# Altium schematic symbol library Schlib1.SchLib: 108 symbols (part 1 of 2)
Pins are listed as number, name and electrical type; pins without a type are passive.

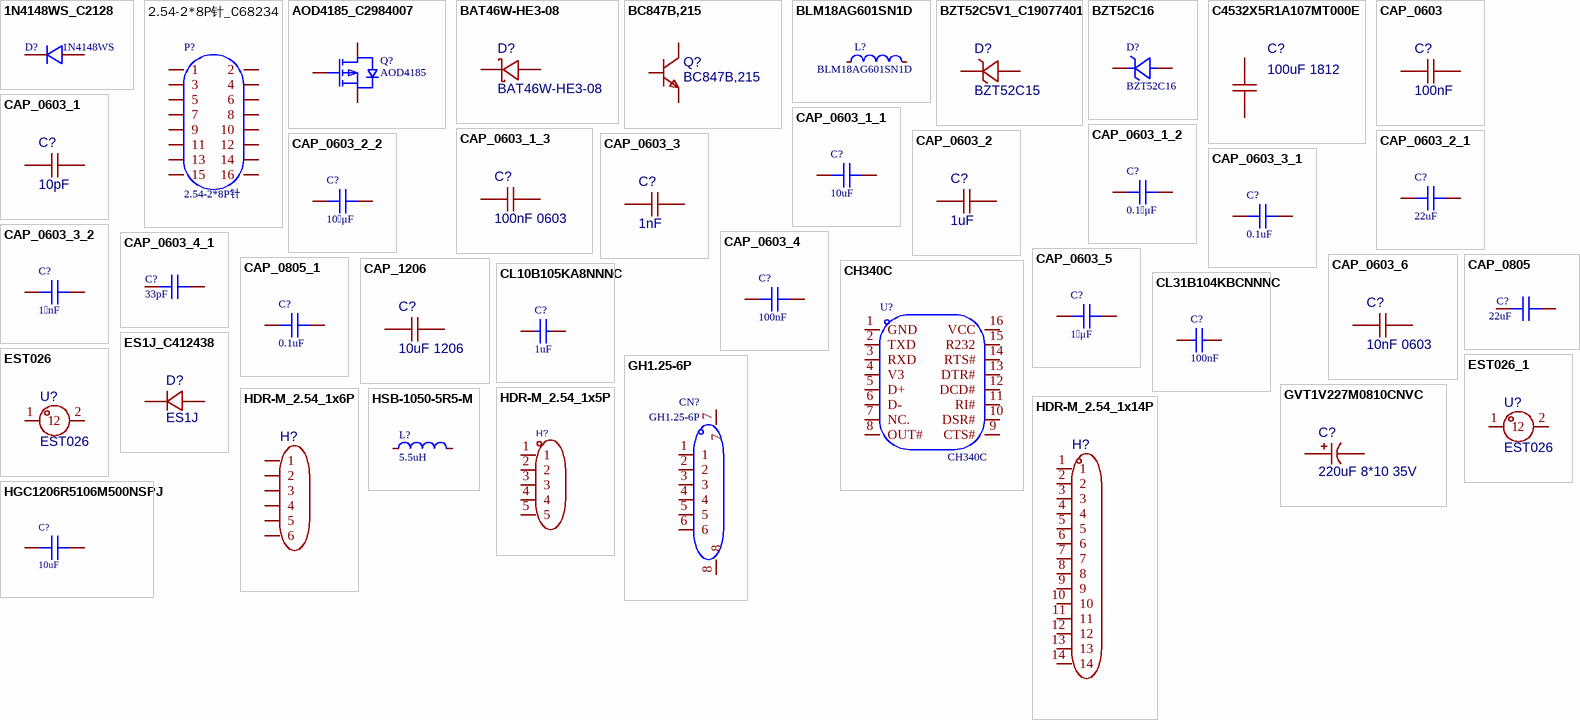
[diagram p0: symbols 1N4148WS_C2128 to HSB-1050-5R5-M]

## 1N4148WS_C2128
designator D?, comment 1N4148WS
二极管配置:独立式;整流电流:150mA;直流反向耐压(Vr):100V;正向压降(Vf):1.25V@150mA;反向恢复时间(Trr):4ns;; Manufacturer: CJ(江苏长电/长晶); Symbol: 1N4148WS T4; Device: 1N4148WS_C2128; 3D Model: db63db13d9e342eb939127d413d6200b聨0819f05c4eef4c71ace90d822a990e87; 3D Model Transform: 104.3305,51.181,0,0,0,0,0,-0.004,0; Diode Configuration: 独立式; Pd - Power Dissipation: 200mW; Current - Rectified: 150mA; Voltage - DC Reverse(Vr): 100V; Non-Repetitive Peak Forward Surge Current: 2A; Reverse Leakage Current (Ir): 1uA@75V; Reverse Recovery Time (trr): 4ns; AddInBom: yes; ModelName: SOD-323_L1.8-W1.3-LS2.5-RD; LCSC Part Name: 丝印T4 100V 150mA; Supplier Part: C2128; Manufacturer Part: 1N4148WS; Supplier Footprint: SOD-323; JLCPCB Part Class: Basic Part; Datasheet: https://item.szlcsc.com/datasheet/1N4148WS/2485.html; Supplier: LCSC; Voltage - Forward(Vf@If): 1.25V@150mA; Operating Junction Temperature Range: -; ConvertToPcb: yes; FootprintName: SOD-323_L1.8-W1.3-LS2.5-RD
footprint SOD-323_L1.8-W1.3-LS2.5-RD
3D model SOD-323_L1.8-W1.3-LS2.5-RD
pins: 1 K, 2 A

## 2.54-2*8P针_C68234
designator P?, comment 2.54-2*8P针
插针结构:2x8P;间距:2.54mm;行距:2.54mm;圆针/方针:方针;安装方式:直插;排数:双排;总PIN位数:16P;额定电流:3A;额定电压:-;配合针长度:5.9mm;塑高:2.54mm;端接针长度:3mm;触头材质:黄铜;触头镀层:金;工作温度:-55℃~+105℃;颜色:黑色;; Manufacturer: BOOMELE(博穆精密); Symbol: Header-Male-2.54_2x8; Device: 2.54-2*8P针_C68234; AddInBom: yes; ModelId: 4229ed04564d49dfa51d40f734d422b6聨0819f05c4eef4c71ace90d822a990e87; ModelName: HDR2.54-M-LI-2X8P; ModelTransform: 799.99844,200,0,0,0,0,0,0,-118.11; Pin Structure: 2x8P; Pitch: 2.54mm; Circluar Pins/Square Pins: 方针; Current Rating: 3A; LCSC Part Name: 2x8P 间距:2.54mm 方针 直插; SupplierPart: C68234; ManufacturerPart: 2.54-2*8P针; Supplier Footprint: 插件,P=2.54mm; JLCPCB Part Class: Extended Part; Datasheet: https://item.szlcsc.com/datasheet/2.54-2*8P%25E9%2592%2588/69336.html; Supplier: LCSC; ConvertToPcb: yes; FootprintName: HDR-TH_16P-P2.54-V-M-R2-C8-S2.54; Row Spacing: 2.54mm; Mounting Type: 直插; Number of Rows: 双排; Number of Pins: 16P; Voltage Rating (Max): -; Length of Mating Pin: 5.9mm; Insulation Height: 2.54mm; Length of End Connection Pin: 3mm; Contact Material: 黄铜; Contact Plating: 金; Operating Temperature: -55℃~+105℃; Color: 黑色
footprint HDR-TH_16P-P2.54-V-M-R2-C8-S2.54
pins: 1, 2, 3, 4, 5, 6, 7, 8, 9, 10, 11, 12, 13, 14, 15, 16

## AOD4185_C2984007
designator Q?, comment AOD4185
Manufacturer: ISC(无锡固电); Symbol: AOD4185_C2984007; 3D Model: ce57f84d66384067af8a68020b6de06d聨0819f05c4eef4c71ace90d822a990e87; 3D Model Transform: 259.842,390.52442,0,90,0,0,-39.39,0,0; AddInBom: yes; ModelName: TO-252-2L-3P_L6.6-W6.1-H2.3-LS10.1-P4.6; Device: AOD4185_C2984007; LCSC Part Name: AOD4185; Supplier Part: C2984007; Manufacturer Part: AOD4185; Supplier Footprint: TO-252; JLCPCB Part Class: Extended Part; Supplier: LCSC; ConvertToPcb: yes; FootprintName: TO-252-2_L6.6-W6.1-P4.57-LS9.9-BR-CW
footprint TO-252-2_L6.6-W6.1-P4.57-LS9.9-BR-CW
3D model TO-252-2L-3P_L6.6-W6.1-H2.3-LS10.1-P4.6
pins: 1 G, 2 D, 3 S

## BAT46W-HE3-08
designator D?
二极管配置:1个独立式;正向压降(Vf):1V@250mA;直流反向耐压(Vr):100V;整流电流:150mA;; Manufacturer: VISHAY(威世); AddInBom: yes; ModelId: 7884390a25fb4c08947731ebfba7e3f8; ModelName: SOD-123_L2.8-W1.8-LS3.7-RD; ModelTransform: 144.8816,62.992,0,0,0,0,0,0,0; Diode Configuration: 1个独立式; Voltage - DC Reverse(Vr): 100V; Current - Rectified: 150mA; Reverse Leakage Current (Ir): 5uA@75V; Non-Repetitive Peak Forward Surge Current: 750mA; Symbol: BAT46W-HE3-08; Device: BAT46W-HE3-08; LCSC Part Name: 停产 电压:100V 电流:150mA; SupplierPart: C145279; ManufacturerPart: BAT46W-HE3-08; Supplier Footprint: SOD-123; JLCPCB Part Class: 扩展库; Datasheet: https://item.szlcsc.com/datasheet/BAT46W-HE3-08/156611.html; Supplier: LCSC; ConvertToPcb: yes; FootprintName: SOD-123_L2.8-W1.8-LS3.7-RD; Voltage - Forward(Vf@If): 1V@250mA
footprint SOD-123_L2.8-W1.8-LS3.7-RD
pins: 1 K, 2 A

## BC847B,215
designator Q?
晶体管类型:NPN;集电极电流(Ic):100mA;集射极击穿电压(Vceo):45V;功率(Pd):250mW;直流电流增益(hFE@Ic,Vce):200@2mA,5V;; Manufacturer: Nexperia(安世); AddInBom: yes; ModelId: c62791f0466c4ae2a892c056b845b0ca; ModelName: SOT-23-3P_L2.9-W1.3-H1.0-LS2.4-P0.95; ModelTransform: 98.425,114.173,0,180,0,0,0.0005,-0.0005,0; Transistor Type: NPN; Collector Current (Ic): 100mA; Collector-Emitter Breakdown Voltage (Vceo): 45V; Power Dissipation (Pd): 250mW; Transition Frequency (fT): 100MHz; Collector Cut-Off Current (Icbo): 5uA; Collector-Emitter Saturation Voltage (VCE(sat)@Ic,Ib): 200mV@100mA,5mA; Symbol: BC847B,215; Device: BC847B,215; LCSC Part Name: NPN 电流:100mA 耐压:45V hfe=200~450; SupplierPart: C57668; ManufacturerPart: BC847B,215; Supplier Footprint: SOT-23; JLCPCB Part Class: 扩展库; Datasheet: https://atta.szlcsc.com/upload/public/pdf/source/20230809/3408F6A472B40CAE49D6B736987AA441.pdf; Supplier: LCSC; ConvertToPcb: yes; FootprintName: SOT-23-3_L2.9-W1.3-P1.90-LS2.4-BR; DC Current Gain (hFE@Ic,Vce): 200@2mA,5V; Operating Temperature: -65℃~+150℃
footprint SOT-23-3_L2.9-W1.3-P1.90-LS2.4-BR
pins: 1, 2, 3

## BLM18AG601SN1D
designator L?
阻抗@频率:600Ω@100MHz;误差:±25%;直流电阻(DCR):380mΩ;; Manufacturer: muRata(村田); 3D Model: 2bc5ec593d464d6ba9807aec0b5673c2聨0819f05c4eef4c71ace90d822a990e87; 3D Model Transform: 62.992,31.496,0,180,0,0,0.094,0.629,0; Tolerance: ±25%; DC Resistance(DCR): 380mΩ; Current Rating: 500mA; Number of Circuits: 1; AddInBom: yes; ModelName: L0603_L1.6-W0.8-H0.5_BEAD; Symbol: BLM18AG601SN1D; Device: BLM18AG601SN1D; LCSC Part Name: 单路 0603磁珠 阻抗600Ω@100MHz; Supplier Part: C19330; Manufacturer Part: BLM18AG601SN1D; Supplier Footprint: 0603; JLCPCB Part Class: Extended Part; Datasheet: https://item.szlcsc.com/datasheet/BLM18AG601SN1D/20038.html; Supplier: LCSC; Impedance @ Frequency: 600Ω@100MHz; Operating Temperature: -55℃~+125℃; ConvertToPcb: yes; FootprintName: L0603
footprint L0603
3D model L0603_L1.6-W0.8-H0.5_BEAD
pins: 1, 2

## BZT52C5V1_C19077401
designator D?, comment BZT52C15
二极管配置:独立式;稳压值(标称值):5.1V;稳压值(范围):4.85V~5.36V;耗散功率(Pd):350mW;; Manufacturer: R+O(宏嘉诚); Symbol: BZT52C5V1_C19077401; AddInBom: yes; ModelId: ad7e39f9e5534b3c96ffdc5532ebb493; ModelName: SOD-123_L2.7-W1.6-H1.4-LS3.7; ModelTransform: 146.026,62.992,0,180,0,0,0.0005,0,0; Diode Configuration: 独立式; Zener Voltage(Nom): 5.1V; Reverse Leakage Current (Ir): 2uA; Pd - Power Dissipation: 350mW; Impedance(Zzt): 60Ω; Impedance(Zzk): 480Ω; Operating Junction Temperature Range: -55℃~+150℃; Manufacturer Part: BZT52C15; Device: BZT52C5V1_C19077401; LCSC Part Name: 表面贴装齐纳二极管; SupplierPart: C19077401; Supplier Footprint: SOD-123; JLCPCB Part Class: 扩展库; Datasheet: https://item.szlcsc.com/datasheet/BZT52C5V1/20275486.html; Supplier: LCSC; ConvertToPcb: yes; FootprintName: SOD-123_L2.7-W1.6-LS3.7-RD; Zener Voltage(Range): 4.85V~5.36V
footprint SOD-123_L2.7-W1.6-LS3.7-RD
pins: 1 K, 2 A

## BZT52C16
designator D?
二极管配置:独立式;稳压值(标称值):16V;稳压值(范围):15.3V~17.1V;耗散功率(Pd):500mW;; Manufacturer: Slkor(萨科微); Symbol: BZT52C16_C707145; 3D Model: ad7e39f9e5534b3c96ffdc5532ebb493聨0819f05c4eef4c71ace90d822a990e87; 3D Model Transform: 146.026,62.992,0,180,0,0,0.0005,0,0; Diode Configuration: 独立式; Zener Voltage(Nom): 16V; Reverse Leakage Current (Ir): 100nA; Pd - Power Dissipation: 500mW; Impedance(Zzt): 40Ω; Operating Junction Temperature Range: -65℃~+150℃; AddInBom: yes; ModelName: SOD-123_L2.7-W1.6-H1.4-LS3.7; Device: BZT52C16; LCSC Part Name: 独立式 耐压:16V 电流:0.1uA; Supplier Part: C707145; Manufacturer Part: BZT52C16; Supplier Footprint: SOD-123; JLCPCB Part Class: Extended Part; Datasheet: https://item.szlcsc.com/datasheet/BZT52C16/744267.html; Supplier: LCSC; Zener Voltage(Range): 15.3V~17.1V; ConvertToPcb: yes; FootprintName: SOD-123_L2.7-W1.6-LS3.7-RD
footprint SOD-123_L2.7-W1.6-LS3.7-RD
3D model SOD-123_L2.7-W1.6-H1.4-LS3.7
pins: 1 K, 2 A

## C4532X5R1A107MT000E
designator C?, comment 100uF 1812
容值:100uF;精度:±20%;额定电压:10V;温度系数:X5R;; Manufacturer: TDK; Symbol: C4532X5R1A107MT000E; AddInBom: yes; ModelId: 654205cbd64044c4b833fe7af5979bc9; ModelName: C1812_L4.5-W3.2-H2.6; ModelTransform: 177.165,125.984,0,0,0,0,0.0005,0,0; Tolerance: ±20%; Voltage Rating: 10V; Temperature Coefficient: X5R; Value: 100uF 1812; Device: C4532X5R1A107MT000E; LCSC Part Name: 100uF ±20% 10V; ManufacturerPart: C4532X5R1A107MT000E; Supplier Footprint: 1812; JLCPCB Part Class: 扩展库; Datasheet: https://item.szlcsc.com/datasheet/C4532X5R1A107MT000E/319453.html; Supplier: LCSC; ConvertToPcb: yes; FootprintName: C1812
footprint C1812
pins: 1, 2

## CAP_0603
designator C?, comment 100nF
Device: CAP_0603; ConvertToPcb: yes; SymbolName: CapAcitance; ModelId: ac125912035d415993ca9572d50418b1; ModelName: C0603_L1.6-W0.8-H0.8; ModelTransform: 62.992,31.496,0,0,0,0,0,0,0; AddInBom: yes; Supplier Footprint: 0603; FootprintName: C0603; Value: 100nF
footprint C0603
pins: 1, 2

## CAP_0603_1
designator C?, comment 10pF
Device: CAP_0603; ConvertToPcb: yes; SymbolName: CapAcitance; ModelId: ac125912035d415993ca9572d50418b1; ModelName: C0603_L1.6-W0.8-H0.8; ModelTransform: 62.992,31.496,0,0,0,0,0,0,0; Value: 10pF; AddInBom: yes; Supplier Footprint: 0603; FootprintName: C0603
footprint C0603
pins: 1, 2

## CAP_0603_1_1
designator C?, comment 10uF
Symbol: Capacitance; Device: CAP_0603; 3D Model: ac125912035d415993ca9572d50418b1聨0819f05c4eef4c71ace90d822a990e87; 3D Model Transform: 62.992,31.496,0,0,0,0,0,0,0; ConvertToPcb: yes; ModelName: C0603_L1.6-W0.8-H0.8; Supplier Footprint: 0603; Value: 10uF; AddInBom: yes; FootprintName: C0402
footprint C0402
3D model C0603_L1.6-W0.8-H0.8
pins: 1, 2

## CAP_0603_1_2
designator C?, comment 0.1 μF
Symbol: Capacitance; Device: CAP_0603; 3D Model: ac125912035d415993ca9572d50418b1聨0819f05c4eef4c71ace90d822a990e87; 3D Model Transform: 62.992,31.496,0,0,0,0,0,0,0; ConvertToPcb: yes; ModelName: C0603_L1.6-W0.8-H0.8; Value: 0.1 μF; Supplier Footprint: 0603; AddInBom: yes; FootprintName: C0603
footprint C0603
3D model C0603_L1.6-W0.8-H0.8
pins: 1, 2

## CAP_0603_1_3
designator C?, comment 100nF 0603
Device: CAP_0603; ConvertToPcb: yes; SymbolName: CapAcitance; ModelId: ac125912035d415993ca9572d50418b1; ModelName: C0603_L1.6-W0.8-H0.8; ModelTransform: 62.992,31.496,0,0,0,0,0,0,0; Value: 100nF 0603; AddInBom: yes; Supplier Footprint: 0603; FootprintName: C0603
footprint C0603
pins: 1, 2

## CAP_0603_2
designator C?, comment 1uF
Device: CAP_0603; ConvertToPcb: yes; SymbolName: CapAcitance; ModelId: ac125912035d415993ca9572d50418b1; ModelName: C0603_L1.6-W0.8-H0.8; ModelTransform: 62.992,31.496,0,0,0,0,0,0,0; Value: 1uF; AddInBom: yes; Supplier Footprint: 0603; FootprintName: C0603
footprint C0603
pins: 1, 2

## CAP_0603_2_1
designator C?, comment 22uF
Symbol: Capacitance; Device: CAP_0603; 3D Model: ac125912035d415993ca9572d50418b1聨0819f05c4eef4c71ace90d822a990e87; 3D Model Transform: 62.992,31.496,0,0,0,0,0,0,0; ConvertToPcb: yes; ModelName: C0603_L1.6-W0.8-H0.8; Supplier Footprint: 0603; Value: 22uF; AddInBom: yes; FootprintName: C0603
footprint C0603
3D model C0603_L1.6-W0.8-H0.8
pins: 1, 2

## CAP_0603_2_2
designator C?, comment 10 μF
Symbol: Capacitance; Device: CAP_0603; 3D Model: ac125912035d415993ca9572d50418b1聨0819f05c4eef4c71ace90d822a990e87; 3D Model Transform: 62.992,31.496,0,0,0,0,0,0,0; ConvertToPcb: yes; ModelName: C0603_L1.6-W0.8-H0.8; Value: 10 μF; Supplier Footprint: 0603; AddInBom: yes; FootprintName: C0603
footprint C0603
3D model C0603_L1.6-W0.8-H0.8
pins: 1, 2

## CAP_0603_3
designator C?, comment 1nF
Device: CAP_0603; ConvertToPcb: yes; SymbolName: CapAcitance; ModelId: ac125912035d415993ca9572d50418b1; ModelName: C0603_L1.6-W0.8-H0.8; ModelTransform: 62.992,31.496,0,0,0,0,0,0,0; Value: 1nF; AddInBom: yes; Supplier Footprint: 0603; FootprintName: C0603
footprint C0603
pins: 1, 2

## CAP_0603_3_1
designator C?, comment 0.1uF
Symbol: Capacitance; Device: CAP_0603; 3D Model: ac125912035d415993ca9572d50418b1聨0819f05c4eef4c71ace90d822a990e87; 3D Model Transform: 62.992,31.496,0,0,0,0,0,0,0; ConvertToPcb: yes; ModelName: C0603_L1.6-W0.8-H0.8; Supplier Footprint: 0603; Value: 0.1uF; AddInBom: yes; FootprintName: C0603
footprint C0603
3D model C0603_L1.6-W0.8-H0.8
pins: 1, 2

## CAP_0603_3_2
designator C?, comment 1 nF
Symbol: Capacitance; Device: CAP_0603; 3D Model: ac125912035d415993ca9572d50418b1聨0819f05c4eef4c71ace90d822a990e87; 3D Model Transform: 62.992,31.496,0,0,0,0,0,0,0; ConvertToPcb: yes; ModelName: C0603_L1.6-W0.8-H0.8; Value: 1 nF; Supplier Footprint: 0603; AddInBom: yes; FootprintName: C0603
footprint C0603
3D model C0603_L1.6-W0.8-H0.8
pins: 1, 2

## CAP_0603_4
designator C?, comment 100nF
Symbol: Capacitance; Device: CAP_0603; 3D Model: ac125912035d415993ca9572d50418b1聨0819f05c4eef4c71ace90d822a990e87; 3D Model Transform: 62.992,31.496,0,0,0,0,0,0,0; ConvertToPcb: yes; ModelName: C0603_L1.6-W0.8-H0.8; Supplier Footprint: 0603; Value: 100nF; AddInBom: yes; FootprintName: C0402
footprint C0402
3D model C0603_L1.6-W0.8-H0.8
pins: 1, 2

## CAP_0603_4_1
designator C?, comment 33pF
Symbol: Capacitance; Device: CAP_0603; 3D Model: ac125912035d415993ca9572d50418b1聨0819f05c4eef4c71ace90d822a990e87; 3D Model Transform: 62.992,31.496,0,0,0,0,0,0,0; ConvertToPcb: yes; ModelName: C0603_L1.6-W0.8-H0.8; Supplier Footprint: 0603; Value: 33pF; AddInBom: yes; FootprintName: C0603
footprint C0603
3D model C0603_L1.6-W0.8-H0.8
pins: 1, 2

## CAP_0603_5
designator C?, comment 1 μF
Symbol: Capacitance; Device: CAP_0603; 3D Model: ac125912035d415993ca9572d50418b1聨0819f05c4eef4c71ace90d822a990e87; 3D Model Transform: 62.992,31.496,0,0,0,0,0,0,0; ConvertToPcb: yes; ModelName: C0603_L1.6-W0.8-H0.8; Value: 1 μF; Supplier Footprint: 0603; AddInBom: yes; FootprintName: C0603
footprint C0603
3D model C0603_L1.6-W0.8-H0.8
pins: 1, 2

## CAP_0603_6
designator C?, comment 10nF 0603
Device: CAP_0603; ConvertToPcb: yes; SymbolName: CapAcitance; ModelId: ac125912035d415993ca9572d50418b1; ModelName: C0603_L1.6-W0.8-H0.8; ModelTransform: 62.992,31.496,0,0,0,0,0,0,0; Value: 10nF 0603; AddInBom: yes; Supplier Footprint: 0603; FootprintName: C0603
footprint C0603
pins: 1, 2

## CAP_0805
designator C?, comment 22uF
Symbol: Capacitance; Device: CAP_0805; 3D Model: 1ba041120af144c991958decab20d241聨0819f05c4eef4c71ace90d822a990e87; 3D Model Transform: 78.74,51.181,0,0,0,0,0,0.0005,0; ConvertToPcb: yes; ModelName: C0805_L2.0-W1.3-H1.3; Supplier Footprint: 0805; Value: 22uF; AddInBom: yes; FootprintName: C0805
footprint C0805
3D model C0805_L2.0-W1.3-H1.3
pins: 1, 2

## CAP_0805_1
designator C?, comment 0.1uF
Symbol: Capacitance; Device: CAP_0805; 3D Model: 1ba041120af144c991958decab20d241聨0819f05c4eef4c71ace90d822a990e87; 3D Model Transform: 78.74,51.181,0,0,0,0,0,0.0005,0; ConvertToPcb: yes; ModelName: C0805_L2.0-W1.3-H1.3; Supplier Footprint: 0805; Value: 0.1uF; AddInBom: yes; FootprintName: C0603
footprint C0603
3D model C0805_L2.0-W1.3-H1.3
pins: 1, 2

## CAP_1206
designator C?, comment 10uF 1206
Device: CAP_1206; ConvertToPcb: yes; SymbolName: CapAcitance; ModelId: e4be705b945545a48e666415e3682bd8; ModelName: C1206_L3.2-W1.6-H1.3; ModelTransform: 125.984,62.992,0,0,0,0,0,0,0; Value: 10uF 1206; AddInBom: yes; Supplier Footprint: 1206; FootprintName: C1206
footprint C1206
pins: 1, 2

## CH340C
designator U?
应用功能:收发器;USB协议版本:USB 2.0;通道数:-;数据速率:2Mbps;; Manufacturer: WCH(南京沁恒); 3D Model: 3361a6792abf4a8f8fbca4f1924a67ee聨0819f05c4eef4c71ace90d822a990e87; 3D Model Transform: 240.39054,393.7,0,90,0,0,0,0,0; Applications Function: 收发器; USB Protocol: USB 2.0; Voltage - Supply: 3.3V；5V; Data Rate: 2Mbps; Current - Supply: 7mA; Quiescent Supply Current: 50uA; AddInBom: yes; ModelName: SOP-16_L9.9-W3.9-H1.5-LS6.0-P1.27; Symbol: CH340C; Device: CH340C; LCSC Part Name: USB转串口芯片; Supplier Part: C84681; Manufacturer Part: CH340C; Supplier Footprint: SOP-16; JLCPCB Part Class: Extended Part; Datasheet: https://item.szlcsc.com/datasheet/CH340C/85852.html; Supplier: LCSC; Number of Channels: -; Operating Temperature: -20℃~+70℃; Features: 可编程波特率；内置时钟发生器；上电复位; ConvertToPcb: yes; FootprintName: SOP-16_L10.0-W3.9-P1.27-LS6.0-BL
footprint SOP-16_L10.0-W3.9-P1.27-LS6.0-BL
3D model SOP-16_L9.9-W3.9-H1.5-LS6.0-P1.27
pins: 1 GND, 2 TXD, 3 RXD, 4 V3, 5 D+, 6 D-, 7 NC., 8 OUT#, 9 CTS#, 10 DSR#, 11 RI#, 12 DCD#, 13 DTR#, 14 RTS#, 15 R232, 16 VCC

## CL10B105KA8NNNC
designator C?, comment 1uF
容值:1uF;精度:±10%;额定电压:25V;温度系数:X7R;; Manufacturer: SAMSUNG(三星); Symbol: CL10B105KA8NNNC; 3D Model: ac125912035d415993ca9572d50418b1聨0819f05c4eef4c71ace90d822a990e87; 3D Model Transform: 62.992,31.496,0,0,0,0,0,0,0; Tolerance: ±10%; Voltage Rating: 25V; Temperature Coefficient: X7R; AddInBom: yes; ModelName: C0603_L1.6-W0.8-H0.8; Device: CL10B105KA8NNNC; LCSC Part Name: 1uF ±10% 25V; Supplier Part: C29936; Manufacturer Part: CL10B105KA8NNNC; Supplier Footprint: 0603; JLCPCB Part Class: Extended Part; Datasheet: https://item.szlcsc.com/datasheet/CL10B105KA8NNNC/30690.html; Supplier: LCSC; Value: 1uF; ConvertToPcb: yes; FootprintName: C0603
footprint C0603
3D model C0603_L1.6-W0.8-H0.8
pins: 1, 2

## CL31B104KBCNNNC
designator C?, comment 100nF
容值:100nF;精度:±10%;额定电压:50V;温度系数:X7R;; Manufacturer: SAMSUNG(三星); Symbol: CL31B104KBCNNNC; AddInBom: yes; ModelId: e4be705b945545a48e666415e3682bd8聨0819f05c4eef4c71ace90d822a990e87; ModelName: C1206_L3.2-W1.6-H1.3; ModelTransform: 125.984,62.992,0,0,0,0,0,0,0; Tolerance: ±10%; Voltage Rating: 50V; Temperature Coefficient: X7R; Device: CL31B104KBCNNNC; LCSC Part Name: 100nF ±10% 50V; SupplierPart: C24497; ManufacturerPart: CL31B104KBCNNNC; Supplier Footprint: 1206; JLCPCB Part Class: Basic Part; Datasheet: https://item.szlcsc.com/datasheet/CL31B104KBCNNNC/25237.html; Supplier: LCSC; ConvertToPcb: yes; FootprintName: C1206; Value: 100nF
footprint C1206
pins: 1, 2

## ES1J_C412438
designator D?, comment ES1J
二极管配置:独立式;正向压降(Vf):1.7V@1A;直流反向耐压(Vr):600V;整流电流:1A;反向恢复时间(Trr):35ns;; Manufacturer: MDD(辰达半导体); Symbol: ES1JG_C412438; Device: ES1J_C412438; AddInBom: yes; ModelId: 4f1e9ef2303f48b48aa8ce0cacf8d7b1; ModelName: SMA_L4.4-W2.8-LS5.4-RD; ModelTransform: 204.724,102.362,0,0,0,0,0,0,0; Diode Configuration: 独立式; Voltage - DC Reverse(Vr): 600V; Current - Rectified: 1A; Reverse Leakage Current (Ir): 5uA@600V; Reverse Recovery Time (trr): 35ns; Operating Junction Temperature Range: -55℃~+150℃@(Tj); LCSC Part Name: 耐压:600V 电流:1A 反向恢复时间：35ns; SupplierPart: C412438; ManufacturerPart: ES1J; Supplier Footprint: SMA; JLCPCB Part Class: 扩展库; Datasheet: https://item.szlcsc.com/datasheet/ES1J/404261.html; Supplier: LCSC; ConvertToPcb: yes; FootprintName: SMA_L4.4-W2.8-LS5.4-RD; Voltage - Forward(Vf@If): 1.7V@1A
footprint SMA_L4.4-W2.8-LS5.4-RD
pins: 1 C, 2 A

## EST026
designator U?
环保; Manufacturer: xcfuse(旭程); AddInBom: yes; ModelId: caeb915258b34f389ee2048176497ca2; ModelName: CONN-TH_L6.3-W0.8-EST026; ModelTransform: 328.7395,78.74,0,0,0,0,0,0,-137.795; Symbol: EST026; Device: EST026; LCSC Part Name: EST026; SupplierPart: C52878; ManufacturerPart: EST026; Supplier Footprint: 插件; JLCPCB Part Class: 扩展库; Datasheet: https://item.szlcsc.com/datasheet/EST026/53893.html; Supplier: LCSC; ConvertToPcb: yes; FootprintName: CONN-TH_L6.3-W0.8-EST026
footprint CONN-TH_L6.3-W0.8-EST026
pins: 1, 2

## EST026_1
designator U?, comment EST026
环保; Manufacturer: xcfuse(旭程); AddInBom: yes; ModelId: caeb915258b34f389ee2048176497ca2; ModelName: CONN-TH_L6.3-W0.8-EST026; ModelTransform: 328.7395,78.74,0,0,0,0,0,0,-137.795; Symbol: EST026; Device: EST026; LCSC Part Name: EST026; SupplierPart: C52878; ManufacturerPart: EST026; Supplier Footprint: 插件; JLCPCB Part Class: 扩展库; Datasheet: https://item.szlcsc.com/datasheet/EST026/53893.html; Supplier: LCSC; ConvertToPcb: yes; FootprintName: CONN-TH_L6.3-W0.8-EST026
footprint CONN-TH_L6.3-W0.8-EST026
pins: 1, 2

## GH1.25-6P
designator CN?
AddInBom: yes; ModelId: 9359f40e5f53415caaa6244a3307f3f9聨0819f05c4eef4c71ace90d822a990e87; ModelName: CONN-SMD_GH1.25-6P; ModelTransform: 425.196,194.8815,0,0,0,0,0,-9.646,0; Symbol: GH1.25-6P; Device: GH1.25-6P; LCSC Part Name: GH1.25-6P; SupplierPart: C9900018610; ManufacturerPart: GH1.25-6P; Supplier Footprint: GH1.25-6P; JLCPCB Part Class: Extended Part; Supplier: LCSC; ConvertToPcb: yes; FootprintName: CONN-SMD_GH1.25-6P
footprint CONN-SMD_GH1.25-6P
pins: 1, 2, 3, 4, 5, 6, 7, 8

## GVT1V227M0810CNVC
designator C?, comment 220uF 8*10 35V
容值:220uF;精度:±20%;额定电压:35V;纹波电流:175mA@120Hz;; Manufacturer: HRK(鸿瑞凯电子); Symbol: GVT1V227M0810CNVC; AddInBom: yes; ModelId: 5c9301d64f8b45ea89e061ac72e6cbf7; ModelName: CAP-SMD_BD8.0-L8.3-W8.3-FD; ModelTransform: 393.7,326.771,0,180,0,0,0,0,0; Tolerance: ±20%; φD: 8mm; L: 10.5mm; Lifetime @ Temp: 2000hrs@105℃; Value: 220uF 8*10 35V; Device: GVT1V227M0810CNVC; LCSC Part Name: 220uF ±20% 35V; ManufacturerPart: GVT1V227M0810CNVC; Supplier Footprint: SMD,D8xL10.5mm; JLCPCB Part Class: 扩展库; Datasheet: https://atta.szlcsc.com/upload/public/pdf/source/20220321/BA17E910A44EA2B508CDD6AB8BA576BA.pdf; Supplier: LCSC; ConvertToPcb: yes; FootprintName: CAP-SMD_BD8.0-L8.3-W8.3-FD; Rated Voltage: 35V; Ripple Current: 175mA@120Hz; Operating Temperature: -55℃~+105℃
footprint CAP-SMD_BD8.0-L8.3-W8.3-FD
pins: 1, 2

## HDR-M_2.54_1x5P
designator H?
Manufacturer: MINTRON(明硕); Symbol: MTP125-1105S1; Device: HDR-M_2.54_1x5P; ConvertToPcb: yes; ModelId: 47d466e4a34f4fc5bc626cf773a24dd5; ModelName: HDR-TH_5P-P2.54-M-LI-1X5P; ModelTransform: 499.999,100,0,0,0,0,0,0,-118.11; Supplier: LCSC; Supplier Part: C358687; Manufacturer Part: MTP125-1105S1; JLCPCB Part Class: Extended Part; AddInBom: yes; Supplier Footprint: 插件; FootprintName: HDR-TH_5P-P2.54-V-M
footprint HDR-TH_5P-P2.54-V-M
pins: 1, 2, 3, 4, 5

## HDR-M_2.54_1x6P
designator H?
Symbol: Header-Male-2.54_1x6; Device: HDR-M_2.54_1x6P; ConvertToPcb: yes; ModelId: 60739dffc9b04830a286435b0fefbd4a; ModelName: HDR2.54-M-LI-1X6P; ModelTransform: 599.999,100,0,0,0,0,0,0,-118.11; AddInBom: yes; SupplierPart: C37208; Supplier Footprint: 插件; FootprintName: HDR-TH_6P-P2.54-V-M-1
footprint HDR-TH_6P-P2.54-V-M-1
pins: 1, 2, 3, 4, 5, 6

## HDR-M_2.54_1x14P
designator H?
间距:2.54mm;总PIN位数:14;排数:1;插针结构:1x14P;行距:-;安装类型:直插;圆针/方针:方针;额定电流:3A;额定电压:-;配合针长度:6mm;塑高:2.5mm;端接针长度:3mm;触头材质:-;工作温度范围:-40℃~+105℃;颜色:黑色;; Symbol: HDR_2.54-1x14P; Device: HDR-M_2.54_1x14P; ConvertToPcb: yes; ModelId: d38966ad4fa34699b6d9af72e76b3bd5; ModelName: HDR-TH_14P-P2.54-M-LI-1X14P; ModelTransform: 1390.155,92.913,0,0,0,0,0,0,-137.795; AddInBom: yes; SupplierPart: C2894937; Supplier Footprint: 插件; FootprintName: HDR-TH_14P-P2.54-V-M
footprint HDR-TH_14P-P2.54-V-M
pins: 1, 2, 3, 4, 5, 6, 7, 8, 9, 10, 11, 12, 13, 14

## HGC1206R5106M500NSPJ
designator C?, comment 10uF
容值:10uF;精度:±20%;额定电压:50V;温度系数:X5R;; Manufacturer: Chinocera(华瓷); Symbol: HGC1206R5106M500NSPJ; AddInBom: yes; ModelId: e4be705b945545a48e666415e3682bd8聨0819f05c4eef4c71ace90d822a990e87; ModelName: C1206_L3.2-W1.6-H1.3; ModelTransform: 125.984,62.992,0,0,0,0,0,0,0; Tolerance: ±20%; Voltage Rating: 50V; Temperature Coefficient: X5R; Device: HGC1206R5106M500NSPJ; LCSC Part Name: 10uF ±20% 50V; SupplierPart: C7432782; ManufacturerPart: HGC1206R5106M500NSPJ; Supplier Footprint: 1206; JLCPCB Part Class: Extended Part; Datasheet: https://item.szlcsc.com/datasheet/HGC1206R5106M500NSPJ/8438264.html; Supplier: LCSC; ConvertToPcb: yes; FootprintName: C1206; Value: 10uF
footprint C1206
pins: 1, 2

## HSB-1050-5R5-M
designator L?, comment 5.5uH
电感值:5.5uH;精度:±20%;额定电流:10A;饱和电流(Isat):12A;; Manufacturer: YOUCHI(佑驰); Symbol: HSB-1050-5R5-M; Tolerance: ±20%; Current Rating: 10A; Current - Saturation(Isat): 12A; DC Resistance(DCR): 10.3mΩ; AddInBom: yes; Device: HSB-1050-5R5-M; LCSC Part Name: 5.5uH  ±20%  12.0A; Supplier Part: C53373579; Manufacturer Part: HSB-1050-5R5-M; Supplier Footprint: SMD,10.5x10.2mm; JLCPCB Part Class: Extended Part; Datasheet: https://item.szlcsc.com/datasheet/HSB-1050-5R5-M/56489689.html; Supplier: LCSC; Value: 5.5uH; ConvertToPcb: yes; FootprintName: IND-SMD_L10.5-W10.2-HSB-1050
footprint IND-SMD_L10.5-W10.2-HSB-1050
pins: 1, 2

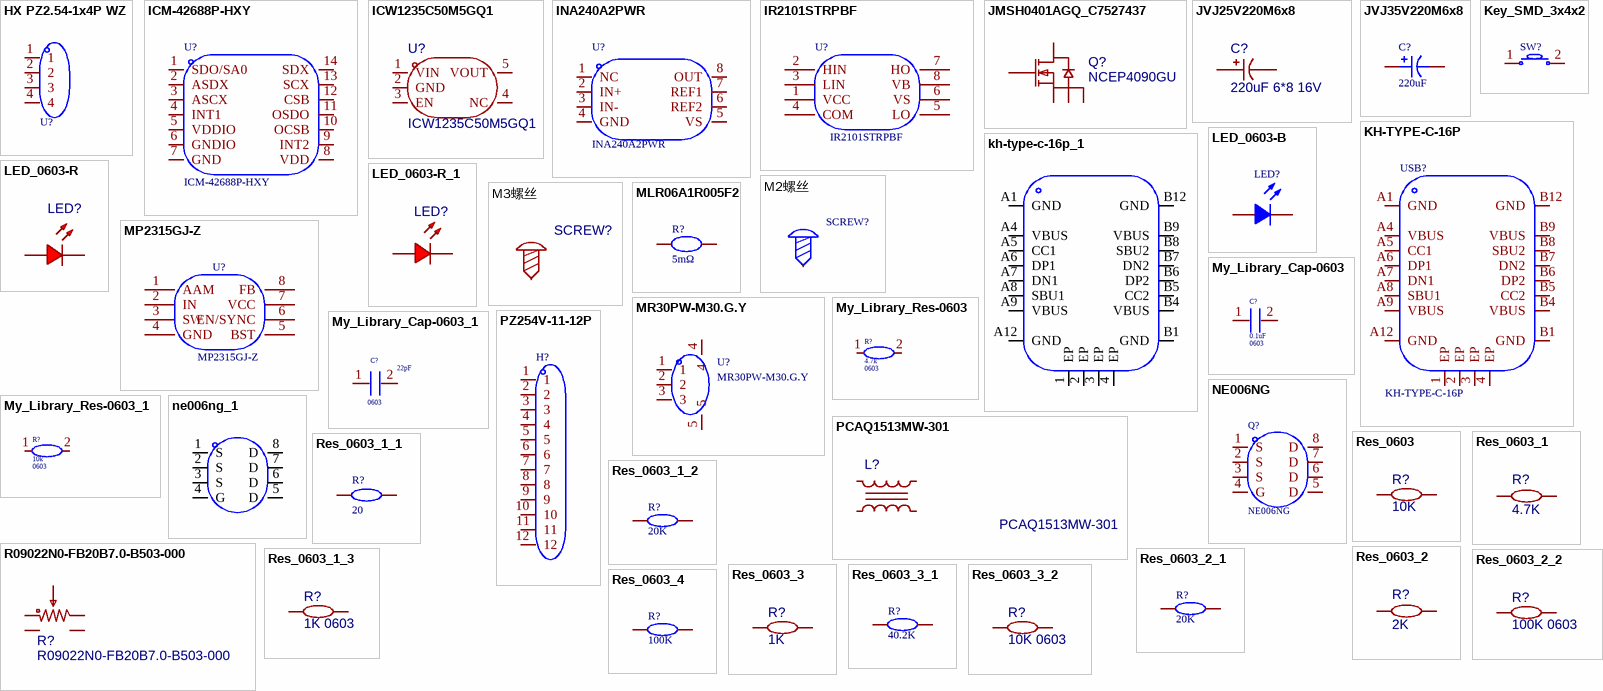
[diagram p1: symbols HX PZ2.54-1x4P WZ to Res_0603_4]

## HX PZ2.54-1x4P WZ
designator U?  (value not drawn)
插针结构:1x4P;间距:2.54mm;行距:-;圆针/方针:方针;安装方式:弯插;排数:单排;总PIN位数:4P;额定电流:3A;额定电压:1kV;配合针长度:6mm;塑高:2.5mm;端接针长度:3mm;触头材质:黄铜;触头镀层:金;工作温度:-40℃~+105℃;颜色:黑色;; Manufacturer: hanxia(韩下); AddInBom: yes; ModelId: 380738e2c3344fc1a10fb2457d15d466聨0819f05c4eef4c71ace90d822a990e87; ModelName: HDR-TH_4P-P2.54-H-M-W10.3; ModelTransform: 400.003,407.873,0,180,0,0,0,191.299,-118.11; Pin Structure: 1x4P; Pitch: 2.54mm; Circluar Pins/Square Pins: 方针; Current Rating: 3A; Voltage Rating (Max): 1kV; Symbol: HX PZ2.54-1X4P WZ; Device: HX PZ2.54-1x4P WZ; LCSC Part Name: 1x4P 间距:2.54mm 方针 弯插; SupplierPart: C32713263; ManufacturerPart: HX PZ2.54-1x4P WZ; Supplier Footprint: 弯插,P=2.54mm; JLCPCB Part Class: Extended Part; Datasheet: https://item.szlcsc.com/datasheet/HX%2520PZ2.54-1x4P%2520WZ/34444543.html; Supplier: LCSC; ConvertToPcb: yes; FootprintName: HDR-TH_4P-P2.54-H-M-W10.3; Row Spacing: -; Mounting Type: 弯插; Number of Rows: 单排; Number of Pins: 4P; Length of Mating Pin: 6mm; Insulation Height: 2.5mm; Length of End Connection Pin: 3mm; Contact Material: 黄铜; Contact Plating: 金; Operating Temperature: -40℃~+105℃; Color: 黑色; Supplementary Features: -
footprint HDR-TH_4P-P2.54-H-M-W10.3
pins: 1, 2, 3, 4

## ICM-42688P-HXY
designator U?
传感器类型:IMU;接口类型:I2C；SPI;; Manufacturer: HXY MOSFET(华轩阳电子); 3D Model: 776ff2ca16fe4df1a7cc54b42a3d63a3聨0819f05c4eef4c71ace90d822a990e87; 3D Model Transform: 118.11,98.425,0,0,0,0,-0.005,0.0005,0; Accelerometer Sensing Axis: X,Y,Z; Acceleration Measurement Range (MAX): ±16g; Gyroscope Measurement Range (MAX): ±2000dps; Sensor Type: IMU; Output Bits: 16bit; Voltage - Supply: 1.71V~3.6V; Standby Current: 4uA; AddInBom: yes; ModelName: LGA-14_L2.5-W3.0-H0.9-P0.50; Symbol: ICM-42688P-HXY; Device: ICM-42688P-HXY; LCSC Part Name: 六轴惯性传感器模块; Supplier Part: C46550687; Manufacturer Part: ICM-42688P-HXY; Supplier Footprint: LGA-14(2.5x3); JLCPCB Part Class: Extended Part; Datasheet: https://item.szlcsc.com/datasheet/ICM-42688P-HXY/48681527.html; Supplier: LCSC; Gyroscope Sensing Axis: X,Y,Z; Interface: I2C；SPI; Cache Size: -; Operating Temperature: -40℃~+85℃; ConvertToPcb: yes; FootprintName: LGA-14_L3.0-W2.5-P0.50-TL
footprint LGA-14_L3.0-W2.5-P0.50-TL
3D model LGA-14_L2.5-W3.0-H0.9-P0.50
pins: 1 SDO/SA0, 2 ASDX, 3 ASCX, 4 INT1, 5 VDDIO, 6 GNDIO, 7 GND, 8 VDD, 9 INT2, 10 OCSB, 11 OSDO, 12 CSB, 13 SCX, 14 SDX

## ICW1235C50M5GQ1
designator U?
输出类型:固定;工作电压:40V;输出电压:5V;输出电流:200mA;电源纹波抑制比(PSRR):-;输出极性:正极;; Manufacturer: ICW(艾创微); AddInBom: yes; ModelId: 7ba65df16e7b4570af156e925f9c37fe; ModelName: SOT-23-5_L2.9-W1.6-P0.95-LS2.8-BR; ModelTransform: 114.173,114.173,0,90,0,0,0,0,0; Output Type: 固定; Voltage - Supply: 40V; Output Voltage: 5V; Output Current: 200mA; standby current: 1.5uA; Output Configuration: 正极; Number of Outputs: 1; Symbol: ICW1235C50M5GQ1; Device: ICW1235C50M5GQ1; LCSC Part Name: 车规级40V耐压、低功耗、高精度LDO转换器; SupplierPart: C5448737; ManufacturerPart: ICW1235C50M5GQ1; Supplier Footprint: SOT23-5; JLCPCB Part Class: 扩展库; Datasheet: https://item.szlcsc.com/datasheet/ICW1235C50M5GQ1/6350612.html; Supplier: LCSC; ConvertToPcb: yes; FootprintName: SOT-23-5_L2.9-W1.6-P0.95-LS2.8-BR; Power Supply Rejection Ratio (PSRR): -; Features: 过热保护；过流保护; Operating Temperature: -40℃~+125℃@(Ta)
footprint SOT-23-5_L2.9-W1.6-P0.95-LS2.8-BR
pins: 1 VIN, 2 GND, 3 EN, 4 NC, 5 VOUT

## INA240A2PWR
designator U?
放大器数:单路;共模电压:-4V~80V;增益:50V/V;带宽:400kHz;; Manufacturer: TI(德州仪器); 3D Model: 85577802f9634e7e85ffa2fd25a37b6f聨0819f05c4eef4c71ace90d822a990e87; 3D Model Transform: 118.11,251.968,0,0,0,0,0,0,0; Number of Channels: 单路; Gain: 50V/V; Bandwidth: 400kHz; Ib - Input Bias Current: 90uA; Vos - Input Offset Voltage: 5uV; Differential Voltage: -80V~+80V; Single Supply: 2.7V~5.5V; Quiescent Current: 1.8mA; Input Offset Voltage Drift(Vos TC): 250nV/℃; Slew Rate: 2V/us; Common Mode Rejection Ratio (CMRR): 132dB; Noise density(eN): 40nV/√Hz@1kHz; AddInBom: yes; ModelName: TSSOP-8_L4.4-W3.0-P0.65-LS6.4-BL-2; Symbol: INA240A2PWR; Device: INA240A2PWR; LCSC Part Name: 具有增强型PWM抑制功能的高侧和低侧双向零漂移电流感测放大器; Supplier Part: C129949; Manufacturer Part: INA240A2PWR; Supplier Footprint: TSSOP-8; JLCPCB Part Class: Extended Part; Datasheet: https://www.ti.com/cn/lit/gpn/ina240; Supplier: LCSC; Vcm - Common Mode Voltage: -4V~80V; Operating Temperature: -40℃~+125℃; Maximum Power Supply Range (Vdd-Vss): -; Dual Supply: -; Output Current: -; Input Offset Current(Ios): -; Input Offset Current Drift (Ios TC): -; ConvertToPcb: yes; FootprintName: TSSOP-8_L4.4-W3.0-P0.65-LS6.4-BL
footprint TSSOP-8_L4.4-W3.0-P0.65-LS6.4-BL
3D model TSSOP-8_L4.4-W3.0-P0.65-LS6.4-BL-2
pins: 1 NC, 2 IN+, 3 IN-, 4 GND, 5 VS, 6 REF2, 7 REF1, 8 OUT

## IR2101STRPBF
designator U?
驱动配置:半桥;负载类型:IGBT；MOSFET;驱动通道数:2;灌电流(IOL):270mA;拉电流(IOH):130mA;工作电压:10V~20V;上升时间(tr):100ns;下降时间(tf):50ns;; Manufacturer: Infineon(英飞凌); 3D Model: 7abc64c95a1a4a04a4ef38f9097c870b聨0819f05c4eef4c71ace90d822a990e87; 3D Model Transform: 192.913,236.22,0,0,0,0,0,0,0; Driven Configuration: 半桥; Number of Drivers: 2; Current - Output Low(IOL): 270mA; Current - Output High(IOH): 130mA; Rise Time: 100ns; Fall Time: 50ns; Propagation Delay tpLH: 160ns; Propagation Delay tpHL: 150ns; Quiescent Current(Iq): 150uA; AddInBom: yes; ModelName: SOIC-8_L5.0-W4.0-P1.27-LS6.0-BL; Symbol: IR2101STRPBF; Device: IR2101STRPBF; LCSC Part Name: 高低侧驱动器; Supplier Part: C2956; Manufacturer Part: IR2101STRPBF; Supplier Footprint: SOIC-8; JLCPCB Part Class: Extended Part; Datasheet: https://item.szlcsc.com/datasheet/IR2101STRPBF/3338.html; Supplier: LCSC; Load Type: IGBT；MOSFET; Voltage - Supply: 10V~20V; Features: 交错导通保护; Operating Temperature: -40℃~+150℃; Input Logic Level - High: -; Input Logic Level - Low: -; ConvertToPcb: yes; FootprintName: SOIC-8_L5.0-W4.0-P1.27-LS6.0-BL
footprint SOIC-8_L5.0-W4.0-P1.27-LS6.0-BL
3D model SOIC-8_L5.0-W4.0-P1.27-LS6.0-BL
pins: 1 VCC, 2 HIN, 3 LIN, 4 COM, 5 LO, 6 VS, 7 HO, 8 VB

## JMSH0401AGQ_C7527437
designator Q?, comment NCEP4090GU
数量:1个N沟道;漏源电压(Vdss):40V;连续漏极电流(Id):197A;导通电阻(RDS(on)):1.3mΩ@10V;耗散功率(Pd):136W;阈值电压(Vgs(th)):2.8V;; Manufacturer: JJW(捷捷微); Symbol: JMSH0401AGQ_C7527437; AddInBom: yes; ModelId: 68f5081a2b0f40dd8e3b8f153db072c6; ModelName: POWERVDFN-8_L5.8-W4.9-H1.0-P1.27; ModelTransform: 229.1334,193.7004,0,90,0,0,-0.001,36.413,0; Number: 1个N沟道; Drain to Source Voltage: 40V; Current - Continuous Drain(Id): 197A; Pd - Power Dissipation: 136W; Gate Threshold Voltage (Vgs(th)): 2.8V; Gate Charge(Qg): 42nC@10V; Input Capacitance(Ciss): 3.015nF; Reverse Transfer Capacitance (Crss@Vds): 18pF; Output Capacitance(Coss): 2nF; Manufacturer Part: NCEP4090GU; Device: JMSH0401AGQ_C7527437; LCSC Part Name: 40V N沟道功率MOSFET; SupplierPart: C7527437; Supplier Footprint: DFN-8(5x6); JLCPCB Part Class: 扩展库; Datasheet: https://item.szlcsc.com/datasheet/JMSH0401AGQ/8622041.html; Supplier: LCSC; ConvertToPcb: yes; FootprintName: POWERVDFN-8_L6.2-W5.2-P1.27-LS6.0-BL; RDS(on): 1.3mΩ@10V
footprint POWERVDFN-8_L6.2-W5.2-P1.27-LS6.0-BL
pins: 1 S, 2 S, 3 S, 4 G, 5 D

## JVJ25V220M6x8
designator C?, comment 220uF 6*8 16V
容值:220uF;精度:±20%;额定电压:25V;纹波电流:120mA@120Hz;; Manufacturer: JIERR(捷而瑞); Symbol: JVJ25V220M6X8; AddInBom: yes; ModelId: ccbda52dceed4b139172c40f75c9da3f; ModelName: CAP-SMD_BD6.3-L6.6-W6.6-LS7.3-FD-H7.7; ModelTransform: 287.401,259.842,0,0,0,0,0,0,0; Tolerance: ±20%; Voltage Rating: 25V; Lifetime: 2000hrs@105℃; Value: 220uF 6*8 16V; Device: JVJ25V220M6x8; LCSC Part Name: 220uF ±20% 25V; ManufacturerPart: JVJ25V220M6x8; Supplier Footprint: SMD,D6.3xL7.7mm; JLCPCB Part Class: 扩展库; Datasheet: https://item.szlcsc.com/datasheet/JVJ25V220M6x8/48680098.html; Supplier: LCSC; ConvertToPcb: yes; FootprintName: CAP-SMD_BD6.3-L6.6-W6.6-LS7.3-FD-H7.7; Ripple Current: 120mA@120Hz; Diameter: 6.3mm; Height - Seated (Max): 7.7mm; Operating Temperature: -55℃~+105℃
footprint CAP-SMD_BD6.3-L6.6-W6.6-LS7.3-FD-H7.7
pins: 1, 2

## JVJ35V220M6x8
designator C?, comment 220uF
容值:220uF;精度:±20%;额定电压:35V;纹波电流:190mA@120Hz;; Manufacturer: JIERR(捷而瑞); Symbol: JVJ35V220M6X8; AddInBom: yes; ModelId: ec7f1c7bda5e4386b54ec5ff3d1d94ff聨0819f05c4eef4c71ace90d822a990e87; ModelName: CAP-SMD_BD6.3-L6.6-W6.6-FD; ModelTransform: 307.086,259.842,0,180,0,0,0,0,0; Tolerance: ±20%; Voltage Rating: 35V; Lifetime: 2000hrs@105℃; Device: JVJ35V220M6x8; LCSC Part Name: 220uF ±20% 35V; SupplierPart: C46550411; ManufacturerPart: JVJ35V220M6x8; Supplier Footprint: SMD,D6.3xL7.7mm; JLCPCB Part Class: Extended Part; Datasheet: https://item.szlcsc.com/datasheet/JVJ35V220M6x8/48680105.html; Supplier: LCSC; ConvertToPcb: yes; FootprintName: CAP-SMD_BD6.3-L6.6-W6.6-FD; Value: 220uF; Ripple Current: 190mA@120Hz; Diameter: 6.3mm; Height - Seated (Max): 7.7mm; Operating Temperature: -55℃~+105℃
footprint CAP-SMD_BD6.3-L6.6-W6.6-FD
pins: 1, 2

## Key_SMD_3x4x2
designator SW?
Symbol: 轻触按键x2; Device: Key_SMD_3x4x2; 3D Model: 63599cce708d48afbce1b0db00354477聨0819f05c4eef4c71ace90d822a990e87; 3D Model Transform: 196.85,114.17,79.13,0,0,0,0,0,0; ConvertToPcb: yes; ModelName: SW-SMD_L4.0-W2.9-H2-LS5.0; Supplier Footprint: SMD; AddInBom: yes; FootprintName: Key_SMD_3x4x2
footprint Key_SMD_3x4x2
3D model SW-SMD_L4.0-W2.9-H2-LS5.0
pins: 1, 2

## KH-TYPE-C-16P
designator USB?
连接器类型:Type-C;协议标准:-;公母:母;安装方式:卧贴;触点数量:16P;端口数量:1;额定电流 - 电源:3A;工作温度:-40℃~+85℃;; Manufacturer: kinghelm(金航标); 3D Model: f2c381012fbf47e0b76dea5162270f01聨0819f05c4eef4c71ace90d822a990e87; 3D Model Transform: 351.9678,307.48,0,0,0,0,0,-45.276,-43.307; Connector Type: Type-C; Gender: 母; Number of Contacts: 16P; Number of Ports: 1; Current Rating-Power: 3A; Voltage Rating: 30V; Connect-Disconnect Life: 1万次; AddInBom: yes; ModelName: USB-C-SMD_KH-TYPE-C-16P; Symbol: KH-TYPE-C-16P; Device: KH-TYPE-C-16P; LCSC Part Name: Type-C 母 卧贴; Supplier Part: C709357; Manufacturer Part: KH-TYPE-C-16P; Supplier Footprint: SMD; JLCPCB Part Class: Extended Part; Datasheet: https://item.szlcsc.com/datasheet/KH-TYPE-C-16P/747093.html; Supplier: LCSC; Protocol Standard: -; Mounting Type: 卧贴; Length: 7.81mm; Operating Temperature: -40℃~+85℃; ConvertToPcb: yes; FootprintName: USB-C-SMD_KH-TYPE-C-16P
footprint USB-C-SMD_KH-TYPE-C-16P
3D model USB-C-SMD_KH-TYPE-C-16P
pins: 1 EP, 2 EP, 3 EP, 4 EP, A1 GND, A4 VBUS, A5 CC1, A6 DP1, A7 DN1, A8 SBU1, A9 VBUS, A12 GND, B1 GND, B4 VBUS, B5 CC2, B6 DP2, B7 DN2, B8 SBU2, B9 VBUS, B12 GND

## kh-type-c-16p_1
designator USB??, comment kh-type-c-16p  (value not drawn)
连接器类型:Type-C;协议标准:-;公母:母;安装方式:卧贴;触点数量:16P;端口数量:1;额定电流 - 电源:3A;工作温度:-40℃~+85℃;; Manufacturer: kinghelm(金航标); AddInBom: yes; ModelId: f2c381012fbf47e0b76dea5162270f01; ModelName: USB-C-SMD_KH-TYPE-C-16P; ModelTransform: 351.9678,307.48,0,0,0,0,0,-45.276,-43.307; Connector Type: Type-C; Gender: 母; Number of Contacts: 16P; Number of Ports: 1; Current Rating-Power: 3A; Voltage Rating: 30V; Connect-Disconnect Life: 1万次; Symbol: KH-TYPE-C-16P; LCSC Part Name: Type-C 母 卧贴; SupplierPart: C709357; ManufacturerPart: KH-TYPE-C-16P; Supplier Footprint: SMD; JLCPCB Part Class: Extended Part; Datasheet: https://item.szlcsc.com/datasheet/KH-TYPE-C-16P/747093.html; Supplier: LCSC; ConvertToPcb: yes; FootprintName: USB-C-SMD_KH-TYPE-C-16P; Protocol Standard: -; Mounting Type: 卧贴; Length: 7.81mm; Operating Temperature: -40℃~+85℃
footprint USB-C-SMD_KH-TYPE-C-16P
pins: 1 EP, 2 EP, 3 EP, 4 EP, A1 GND, A4 VBUS, A5 CC1, A6 DP1, A7 DN1, A8 SBU1, A9 VBUS, A12 GND, B1 GND, B4 VBUS, B5 CC2, B6 DP2, B7 DN2, B8 SBU2, B9 VBUS, B12 GND

## LED_0603-B
designator LED?
Symbol: LED_B; Device: LED_0603-B; Convert to PCB: yes; 3D Model: eb8d964598f24248affda46f619856c5聨0819f05c4eef4c71ace90d822a990e87; 3D Model Transform: 63.1,31.6,23.7,0,0,0,0,0,0; ModelName: LED-0603_B; Add into BOM: yes; Supplier Footprint: 0603; FootprintName: LED_0603
footprint LED_0603
pins: 1 C, 2 A

## LED_0603-R
designator LED?
Symbol: LED_R; Device: LED_0603-R; Convert to PCB: yes; 3D Model: dd8257b0d61a4cd7b68939a056e08095; 3D Model Transform: 58.72,29.4,22.03,0,0,0,0,0,0; ModelName: LED-0603_R; Add into BOM: yes; Supplier Footprint: 0603; FootprintName: LED_0603
footprint LED_0603
pins: 1 C, 2 A

## LED_0603-R_1
designator LED?
Symbol: LED_R; Device: LED_0603-R; Convert to PCB: yes; 3D Model: dd8257b0d61a4cd7b68939a056e08095; 3D Model Transform: 58.72,29.4,22.03,0,0,0,0,0,0; ModelName: LED-0603_R; Add into BOM: yes; Supplier Footprint: 0603; FootprintName: LED_0603
footprint LED_0603
pins: 1 C, 2 A

## M2螺丝
designator SCREW?
Symbol: 螺丝孔; Device: M2螺丝; ConvertToPcb: yes; AddInBom: yes; Supplier Footprint: 插件; FootprintName: M2螺丝
footprint M2螺丝
pins: 1

## M3螺丝
designator SCREW?
Device: M3螺丝; ConvertToPcb: yes; SymbolName: 螺丝孔; AddInBom: yes; Supplier Footprint: 插件; FootprintName: M3螺丝
footprint PCBComponent_1 - duplicate
pins: 1

## MLR06A1R005F2
designator R?, comment 5mΩ
电阻类型:合金电阻;阻值:5mΩ;精度:±1%;功率:1W;温度系数:±50ppm/℃;安装方式:贴片;; Manufacturer: prosemi(普罗森美); Symbol: MLR06A1R005F2; AddInBom: yes; ModelId: f1de2025d8034c8f979ea2bb0fb44f5c聨0819f05c4eef4c71ace90d822a990e87; ModelName: R0612; ModelTransform: 62.992,125.984,0,0,0,0,0,0,0; Tolerance: ±1%; Power(Watts): 1W; Device: MLR06A1R005F2; LCSC Part Name: 5mΩ ±1% 1W; SupplierPart: C21261109; ManufacturerPart: MLR06A1R005F2; Supplier Footprint: 0612; JLCPCB Part Class: Extended Part; Datasheet: https://item.szlcsc.com/datasheet/MLR06A1R005F2/22679766.html; Supplier: LCSC; ConvertToPcb: yes; FootprintName: R0612; Type: 合金电阻; Value: 5mΩ; Temperature Coefficient: ±50ppm/℃; Mounting Type: 贴片
footprint R0612
pins: 1, 2

## MP2315GJ-Z
designator U?
功能类型:降压型;工作电压:4.5V~24V;输出电压:800mV~22.8V;输出电流:3A;输出类型:可调;; Manufacturer: MPS(芯源); 3D Model: a4a866e84c1d4e21a00dbb6d6e7ebbb6聨0819f05c4eef4c71ace90d822a990e87; 3D Model Transform: 110.45568,114.173,0,180,0,0,0,0,0; Function: 降压型; Output Current: 3A; Frequency - Switching: 500kHz; Synchronous Rectifier: 是; Number of Outputs: 1; Topology: 降压式; Quiescent Current: 180uA; Switch tube (built-in/external): 内置; Output Type: 可调; AddInBom: yes; ModelName: TSOT-23-8_L2.9-W1.6-P0.65-LS2.8-BR; Symbol: MP2315GJ-Z; Device: MP2315GJ-Z; LCSC Part Name: 降压型 3A 4.5V~24V; Supplier Part: C45889; Manufacturer Part: MP2315GJ-Z; Supplier Footprint: TSOT-23-8; JLCPCB Part Class: Extended Part; Datasheet: https://item.szlcsc.com/datasheet/MP2315GJ-Z/46892.html; Supplier: LCSC; Voltage - Supply: 4.5V~24V; Output Voltage: 800mV~22.8V; Operating Temperature: -40℃~+125℃; Features: 轻载高效模式；内置LDO稳压器；频率同步；逐波限流；过流保护；打嗝限流; ConvertToPcb: yes; FootprintName: TSOT-23-8_L2.9-W1.6-P0.65-LS2.8-BR
footprint TSOT-23-8_L2.9-W1.6-P0.65-LS2.8-BR
3D model TSOT-23-8_L2.9-W1.6-P0.65-LS2.8-BR
pins: 1 AAM, 2 IN, 3 SW, 4 GND, 5 BST, 6 EN/SYNC, 7 VCC, 8 FB

## MR30PW-M30.G.Y
designator U?
Manufacturer: AMASS(艾迈斯); AddInBom: yes; ModelId: e8638a615c594f11ac0319766163e5d9聨0819f05c4eef4c71ace90d822a990e87; ModelName: CONN-TH_MR30PW-M30-G-Y; ModelTransform: 606.298,549.197,0,0,0,0,0,-39.37,-78.74; Symbol: MR30PW-M30.G.Y; Device: MR30PW-M30.G.Y; LCSC Part Name: AMASS(艾迈斯)三芯动力电池马达电调航模插头连接器 弯插公头 金黄H=3mm MR30PW-M30.G.Y; SupplierPart: C19268036; ManufacturerPart: MR30PW-M30.G.Y; Supplier Footprint: -; JLCPCB Part Class: Extended Part; Datasheet: https://item.szlcsc.com/datasheet/MR30PW-M30.G.Y/20526047.html; Supplier: LCSC; ConvertToPcb: yes; FootprintName: CONN-TH_MR30PW-M30-G-Y
footprint CONN-TH_MR30PW-M30-G-Y
pins: 1, 2, 3, 4, 5

## My_Library_Cap-0603
designator C?  value 0.1uF  Footprint_1: 0603  (hidden comment: My_Library_Cap-0603)
Origin Footprint: MyPCBLibrary:C0603; AddInBom: yes; Symbol: My_Library_Cap-0603; Device: My_Library_Cap-0603
footprint C0603
pins: 1, 2

## My_Library_Cap-0603_1
designator C?, comment value 22pF  Footprint_1: 0603  (hidden comment: My_Library_Cap-0603)
Origin Footprint: MyPCBLibrary:C0603; AddInBom: yes; Symbol: My_Library_Cap-0603; Device: My_Library_Cap-0603
footprint C0603
pins: 1, 2

## My_Library_Res-0603
designator R?  value 4.7k  Footprint_1: 0603  (hidden comment: My_Library_Res-0603)
Origin Footprint: MyPCBLibrary:R0603; AddInBom: yes; Symbol: My_Library_Res-0603; Device: My_Library_Res-0603
footprint R0603
pins: 1, 2

## My_Library_Res-0603_1
designator R?, comment value 10k  Footprint_1: 0603  (hidden comment: My_Library_Res-0603)
Origin Footprint: MyPCBLibrary:R0603; AddInBom: yes; Symbol: My_Library_Res-0603; Device: My_Library_Res-0603
footprint R0603
pins: 1, 2

## NE006NG
designator Q?
数量:1个N沟道;漏源电压(Vdss):60V;连续漏极电流(Id):70A;导通电阻(RDS(on)):4.6mΩ@10V;耗散功率(Pd):84W;阈值电压(Vgs(th)):2.7V;; Manufacturer: DOINGTER(杜因特); 3D Model: 82d86f10988147ef9b82700d9bd42f65聨0819f05c4eef4c71ace90d822a990e87; 3D Model Transform: 200.787,239.17275,0,0,0,0,0.002,-0.004,0; Number: 1个N沟道; Drain to Source Voltage: 60V; Current - Continuous Drain(Id): 70A; Pd - Power Dissipation: 84W; Gate Threshold Voltage (Vgs(th)): 2.7V; Gate Charge(Qg): 90nC@10V; Input Capacitance(Ciss): 4nF; Reverse Transfer Capacitance (Crss@Vds): 252pF; Type: N沟道; Output Capacitance(Coss): 309pF; AddInBom: yes; ModelName: DFN5X6-8_L5.8-W5.0-P1.27-LS6.2-BL-EP; Symbol: NE006NG; Device: NE006NG; LCSC Part Name: N沟道MOSFET采用先进沟槽技术，具备低栅极电荷和出色散热性能; Supplier Part: C54157801; Manufacturer Part: NE006NG; Supplier Footprint: DFN-8(5x6); JLCPCB Part Class: Extended Part; Datasheet: https://item.szlcsc.com/datasheet/NE006NG/57396370.html; Supplier: LCSC; RDS(on): 4.6mΩ@10V; Operating Temperature: -50℃~+150℃; ConvertToPcb: yes; FootprintName: DFN5X6-8_L5.8-W5.0-P1.27-LS6.2-BL-EP
footprint DFN5X6-8_L5.8-W5.0-P1.27-LS6.2-BL-EP
3D model DFN5X6-8_L5.8-W5.0-P1.27-LS6.2-BL-EP
pins: 1 S, 2 S, 3 S, 4 G, 5 D, 6 D, 7 D, 8 D

## ne006ng_1
designator Q??, comment ne006ng  (value not drawn)
数量:1个N沟道;漏源电压(Vdss):60V;连续漏极电流(Id):70A;导通电阻(RDS(on)):4.6mΩ@10V;耗散功率(Pd):84W;阈值电压(Vgs(th)):2.7V;; Manufacturer: DOINGTER(杜因特); AddInBom: yes; ModelId: 82d86f10988147ef9b82700d9bd42f65; ModelName: DFN5X6-8_L5.8-W5.0-P1.27-LS6.2-BL-EP; ModelTransform: 200.787,239.17275,0,0,0,0,0.002,-0.004,0; Number: 1个N沟道; Drain to Source Voltage: 60V; Current - Continuous Drain(Id): 70A; Pd - Power Dissipation: 84W; Gate Threshold Voltage (Vgs(th)): 2.7V; Gate Charge(Qg): 90nC@10V; Input Capacitance(Ciss): 4nF; Reverse Transfer Capacitance (Crss@Vds): 252pF; Type: N沟道; Output Capacitance(Coss): 309pF; LCSC Part Name: N沟道MOSFET采用先进沟槽技术，具备低栅极电荷和出色散热性能; SupplierPart: C54157801; ManufacturerPart: NE006NG; Supplier Footprint: DFN-8(5x6); JLCPCB Part Class: Extended Part; Datasheet: https://item.szlcsc.com/datasheet/NE006NG/57396370.html; Supplier: LCSC; ConvertToPcb: yes; SymbolName: NE006NG; FootprintName: DFN5X6-8_L5.8-W5.0-P1.27-LS6.2-BL-EP; RDS(on): 4.6mΩ@10V; Operating Temperature: -50℃~+150℃
footprint DFN5X6-8_L5.8-W5.0-P1.27-LS6.2-BL-EP
pins: 1 S, 2 S, 3 S, 4 G, 5 D, 6 D, 7 D, 8 D

## PCAQ1513MW-301
designator L?
通道数:2;阻抗@频率:300Ω@100MHz;直流电阻(DCR):6mΩ;; Manufacturer: PROD(谱罗德); AddInBom: yes; ModelId: b7d4aa24894142bebd21e640747a476a; ModelName: FILTER-SMD_4P-L15.0-W13.0-BL-1; ModelTransform: 511.81,590.55,0,90,0,0,-0.004,0.003,0; Number of Lines: 2; Current Rating: 13A; Voltage Rating - DC: 125V; DC Resistance(DCR): 6mΩ; Insulation Resistance(IR): 10MΩ; Symbol: PCAQ1513MW-301; Device: PCAQ1513MW-301; LCSC Part Name: 两路 贴片共模滤波器 阻抗300Ω@100MHz; SupplierPart: C2916880; ManufacturerPart: PCAQ1513MW-301; Supplier Footprint: SMD-4P,15x13mm; JLCPCB Part Class: 扩展库; Datasheet: https://item.szlcsc.com/datasheet/PCAQ1513MW-301/3213201.html; Supplier: LCSC; ConvertToPcb: yes; FootprintName: FILTER-SMD_4P-L15.0-W13.0-BL-1; Voltage Withstand: -; Voltage Rating (AC): 125V; Impedance @ Frequency: 300Ω@100MHz; Operating Temperature: -25℃~+125℃
footprint FILTER-SMD_4P-L15.0-W13.0-BL-1
pins: 1, 2, 3, 4

## PZ254V-11-12P
designator H?  (value not drawn)
插针结构:1x12P;间距:2.54mm;行距:-;圆针/方针:方针;安装方式:直插;排数:单排;总PIN位数:12P;额定电流:3A;额定电压:250V;配合针长度:6mm;塑高:2.5mm;端接针长度:3mm;触头材质:-;工作温度:-40℃~+105℃;颜色:黑色;; Manufacturer: XFCN(兴飞); 3D Model: 3dba4cf9b1d14f4b93786901a7682825聨0819f05c4eef4c71ace90d822a990e87; 3D Model Transform: 1199.998,100,0,0,0,0,0,0,-118.11; Pin Structure: 1x12P; Pitch: 2.54mm; Circluar Pins/Square Pins: 方针; Current Rating: 3A; Voltage Rating (Max): 250V; AddInBom: yes; ModelName: HDR2.54-M-LI-1X12P; Symbol: PZ254V-11-12P; Device: PZ254V-11-12P; LCSC Part Name: 1x12P 间距:2.54mm 方针 直插; Supplier Part: C2840012; Manufacturer Part: PZ254V-11-12P; Supplier Footprint: 插件,P=2.54mm; JLCPCB Part Class: Extended Part; Datasheet: https://item.szlcsc.com/datasheet/PZ254V-11-12P/3017606.html; Supplier: LCSC; Row Spacing: -; Mounting Type: 直插; Number of Rows: 单排; Number of Pins: 12P; Length of Mating Pin: 6mm; Insulation Height: 2.5mm; Length of End Connection Pin: 3mm; Contact Material: -; Operating Temperature: -40℃~+105℃; Color: 黑色; ConvertToPcb: yes; FootprintName: HDR-TH_12P-P2.54-V-M
footprint HDR-TH_12P-P2.54-V-M
3D model HDR2.54-M-LI-1X12P
pins: 1, 2, 3, 4, 5, 6, 7, 8, 9, 10, 11, 12

## R09022N0-FB20B7.0-B503-000
designator R?
可调电阻旋转电位器; Manufacturer: CTR(长泰尔电子); AddInBom: yes; ModelId: 71d2ca23f0844f7d968f95a814dfb0e2; ModelName: RES-ADJ-TH_R09022N0-FB20B7B503-0004; ModelTransform: 450.24737,500.038,0,0,0,0,0,104.055,-149.606; Voltage Rating: 10V; Symbol: R09022N0-FB20B7.0-B503-000; Device: R09022N0-FB20B7.0-B503-000; LCSC Part Name: R09022N0-FB20B7.0-B503-000; SupplierPart: C18213417; ManufacturerPart: R09022N0-FB20B7.0-B503-000; Supplier Footprint: 插件; JLCPCB Part Class: 扩展库; Datasheet: https://atta.szlcsc.com/upload/public/pdf/source/20231010/93ED3CE9FDD6AC93F067D89ACCCFD006.pdf; Supplier: LCSC; ConvertToPcb: yes; FootprintName: RES-ADJ-TH_R09022N0-FB20B7B503-0004
footprint RES-ADJ-TH_R09022N0-FB20B7B503-0004
pins: 1, 2, 3, 4, 5

## Res_0603
designator R?, comment 10K
Symbol: 电阻; Device: Res_0603; ConvertToPcb: yes; ModelId: fc143cca1e79419f9cd78b61e9279f08; ModelName: R0603; ModelTransform: 31.8897,63.7794,0,90,0,0,0,0,0; AddInBom: yes; Supplier Footprint: 0603; FootprintName: R0603; Value: 10K
footprint R0603
pins: 1, 2

## Res_0603_1
designator R?, comment 4.7K
Symbol: 电阻; Device: Res_0603; ConvertToPcb: yes; ModelId: fc143cca1e79419f9cd78b61e9279f08; ModelName: R0603; ModelTransform: 31.8897,63.7794,0,90,0,0,0,0,0; Value: 4.7K; AddInBom: yes; Supplier Footprint: 0603; FootprintName: R0603
footprint R0603
pins: 1, 2

## Res_0603_1_1
designator R?, comment 20
Symbol: 电阻; Device: Res_0603; 3D Model: fc143cca1e79419f9cd78b61e9279f08聨0819f05c4eef4c71ace90d822a990e87; 3D Model Transform: 31.8897,63.7794,0,90,0,0,0,0,0; ConvertToPcb: yes; ModelName: R0603; Supplier Footprint: 0603; Value: 20; AddInBom: yes; FootprintName: R0603
footprint R0603
3D model R0603
pins: 1, 2

## Res_0603_1_2
designator R?, comment 20K
Symbol: 电阻; Device: Res_0603; 3D Model: fc143cca1e79419f9cd78b61e9279f08聨0819f05c4eef4c71ace90d822a990e87; 3D Model Transform: 31.8897,63.7794,0,90,0,0,0,0,0; ConvertToPcb: yes; ModelName: R0603; Supplier Footprint: 0603; Value: 20K; AddInBom: yes; FootprintName: R0603
footprint R0603
3D model R0603
pins: 1, 2

## Res_0603_1_3
designator R?, comment 1K 0603
Symbol: 电阻; Device: Res_0603; ConvertToPcb: yes; ModelId: fc143cca1e79419f9cd78b61e9279f08; ModelName: R0603; ModelTransform: 31.8897,63.7794,0,90,0,0,0,0,0; Value: 1K 0603; AddInBom: yes; Supplier Footprint: 0603; FootprintName: R0603
footprint R0603
pins: 1, 2

## Res_0603_2
designator R?, comment 2K
Symbol: 电阻; Device: Res_0603; ConvertToPcb: yes; ModelId: fc143cca1e79419f9cd78b61e9279f08; ModelName: R0603; ModelTransform: 31.8897,63.7794,0,90,0,0,0,0,0; Value: 2K; AddInBom: yes; Supplier Footprint: 0603; FootprintName: R0603
footprint R0603
pins: 1, 2

## Res_0603_2_1
designator R?, comment 20K
Symbol: 电阻; Device: Res_0603; 3D Model: fc143cca1e79419f9cd78b61e9279f08聨0819f05c4eef4c71ace90d822a990e87; 3D Model Transform: 31.8897,63.7794,0,90,0,0,0,0,0; ConvertToPcb: yes; ModelName: R0603; Supplier Footprint: 0603; Value: 20K; AddInBom: yes; FootprintName: R0603
footprint R0603
3D model R0603
pins: 1, 2

## Res_0603_2_2
designator R?, comment 100K 0603
Symbol: 电阻; Device: Res_0603; ConvertToPcb: yes; ModelId: fc143cca1e79419f9cd78b61e9279f08; ModelName: R0603; ModelTransform: 31.8897,63.7794,0,90,0,0,0,0,0; Value: 100K 0603; AddInBom: yes; Supplier Footprint: 0603; FootprintName: R0603
footprint R0603
pins: 1, 2

## Res_0603_3
designator R?, comment 1K
Symbol: 电阻; Device: Res_0603; ConvertToPcb: yes; ModelId: fc143cca1e79419f9cd78b61e9279f08; ModelName: R0603; ModelTransform: 31.8897,63.7794,0,90,0,0,0,0,0; Value: 1K; AddInBom: yes; Supplier Footprint: 0603; FootprintName: R0603
footprint R0603
pins: 1, 2

## Res_0603_3_1
designator R?, comment 40.2K
Symbol: 电阻; Device: Res_0603; 3D Model: fc143cca1e79419f9cd78b61e9279f08聨0819f05c4eef4c71ace90d822a990e87; 3D Model Transform: 31.8897,63.7794,0,90,0,0,0,0,0; ConvertToPcb: yes; ModelName: R0603; Supplier Footprint: 0603; Value: 40.2K; AddInBom: yes; FootprintName: R0603
footprint R0603
3D model R0603
pins: 1, 2

## Res_0603_3_2
designator R?, comment 10K 0603
Symbol: 电阻; Device: Res_0603; ConvertToPcb: yes; ModelId: fc143cca1e79419f9cd78b61e9279f08; ModelName: R0603; ModelTransform: 31.8897,63.7794,0,90,0,0,0,0,0; Value: 10K 0603; AddInBom: yes; Supplier Footprint: 0603; FootprintName: R0603
footprint R0603
pins: 1, 2

## Res_0603_4
designator R?, comment 100K
Symbol: 电阻; Device: Res_0603; 3D Model: fc143cca1e79419f9cd78b61e9279f08聨0819f05c4eef4c71ace90d822a990e87; 3D Model Transform: 31.8897,63.7794,0,90,0,0,0,0,0; ConvertToPcb: yes; ModelName: R0603; Supplier Footprint: 0603; Value: 100K; AddInBom: yes; FootprintName: R0603
footprint R0603
3D model R0603
pins: 1, 2

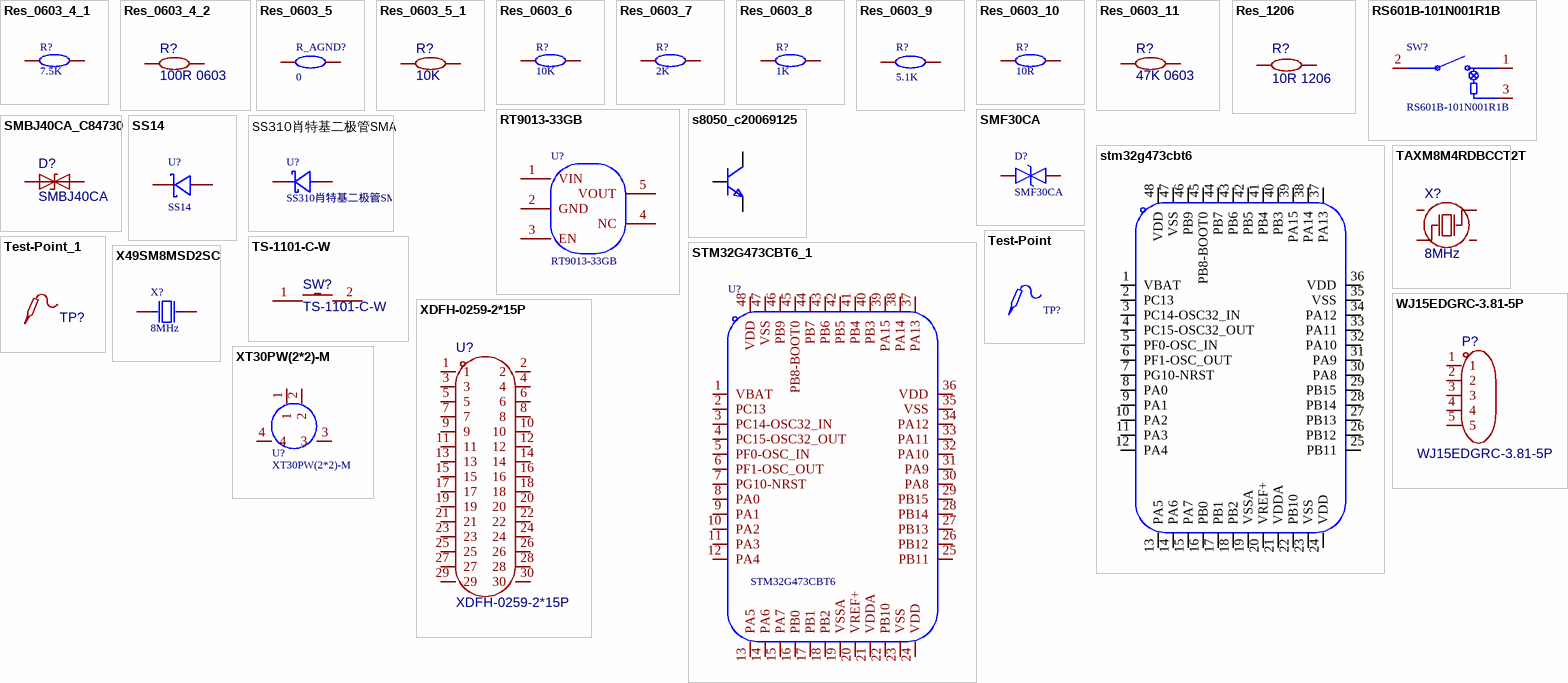
[diagram p2: symbols Res_0603_4_1 to XT30PW(2*2)-M]

## Res_0603_4_1
designator R?, comment 7.5K
Symbol: 电阻; Device: Res_0603; 3D Model: fc143cca1e79419f9cd78b61e9279f08聨0819f05c4eef4c71ace90d822a990e87; 3D Model Transform: 31.8897,63.7794,0,90,0,0,0,0,0; ConvertToPcb: yes; ModelName: R0603; Supplier Footprint: 0603; Value: 7.5K; AddInBom: yes; FootprintName: R0603
footprint R0603
3D model R0603
pins: 1, 2